# Altium footprint library SMAJ5P0A-13-F.PcbLib: 3 footprints
Each footprint in its own frame and in the unit in brackets; x right, y up, seen from the top. Pads: shape width x height; smd on the part's side, far side on the other; paste and mask are expansions set on the pad; w line width, h text height; cw(c..) or ccw(c..) is an arc to the next point about the centre after c.
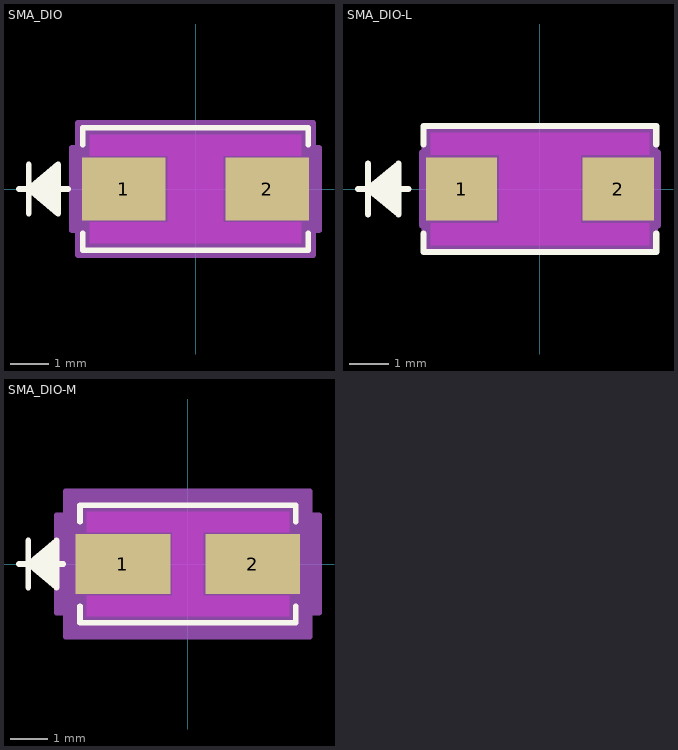
[diagram p0: the footprints below, top view; thin cyan lines are the x and y axes]

## SMA_DIO [mm]
pads (2):
  rect 2.17x1.63 smd paste+0 mask+0: 1(-1.86,0) 2(1.86,0)
Top Layer keep-out:
  region: -0.724,-0.866 -0.724,0.866 0.724,0.866 0.724,-0.866
  region: -2.744,0.866 -2.744,1.409 2.744,1.409 2.744,0.866
  region: -2.744,-1.409 -2.744,-0.866 2.744,-0.866 2.744,-1.409
Top Overlay:
  lines w0.152: -4.573,0 -3.303,0 ; -4.319,-0.635 -4.319,0.635 ; -3.557,-0.508 -4.319,0 ; -3.557,-0.381 -4.319,0 ; -3.557,-0.254 -4.319,0 ; -3.557,-0.127 -4.319,0 ; -3.557,0.127 -4.319,0 ; -3.557,0.254 -4.319,0 ; -3.557,0.381 -4.319,0 ; -3.557,0.508 -4.319,0 ; -2.922,-1.148 -2.922,-1.587 2.922,-1.587 2.922,-1.148 ; -2.922,1.148 -2.922,1.587 2.922,1.587 2.922,1.148 ; -4.319,0 -3.557,0.635 -3.557,-0.635 -4.319,0
  text ".Designator" at -3.492,-0.635 h1.27
Keep-Out Layer:
  region: -0.724,-0.866 -0.724,0.866 0.724,0.866 0.724,-0.866
Mechanical 13:
  lines w0.025: -4.573,0 -3.303,0 ; -4.319,-0.635 -4.319,0.635 ; -3.557,-0.508 -4.319,0 ; -3.557,-0.381 -4.319,0 ; -3.557,-0.254 -4.319,0 ; -3.557,-0.127 -4.319,0 ; -3.557,0.127 -4.319,0 ; -3.557,0.254 -4.319,0 ; -3.557,0.381 -4.319,0 ; -3.557,0.508 -4.319,0 ; -4.319,0 -3.557,0.635 -3.557,-0.635 -4.319,0 ; -2.795,-1.46 2.795,-1.46 2.795,1.46 -2.795,1.46 -2.795,-1.46
  text ".Designator" at -3.492,-0.635 h1.27
Mechanical 15:
  region: -3.049,-1.069 -3.199,-1.069 -3.199,1.069 -3.049,1.069 -3.049,1.714 3.049,1.714 3.049,1.069 3.199,1.069 3.199,-1.069 3.049,-1.069 3.049,-1.714 -3.049,-1.714
  lines w0.152: -3.199,-1.069 -3.199,1.069 -3.049,1.069 -3.049,1.714 3.049,1.714 3.049,1.069 3.199,1.069 3.199,-1.069 3.049,-1.069 3.049,-1.714 -3.049,-1.714 -3.049,-1.069 -3.199,-1.069
3D body "SMA_DIO.step": height 2.35, standoff 0, extent -2.795,-1.46 2.795,1.46

## SMA_DIO-L [mm]
pads (2):
  rect 1.79x1.58 smd paste+0 mask+0: 1(-1.97,0) 2(1.97,0)
Top Layer keep-out:
  region: -1.024,-0.866 -1.024,0.866 1.024,0.866 1.024,-0.866
  region: -2.744,0.866 -2.744,1.409 2.744,1.409 2.744,0.866
  region: -2.744,-1.409 -2.744,-0.866 2.744,-0.866 2.744,-1.409
Top Overlay:
  lines w0.152: -4.573,0 -3.303,0 ; -4.319,-0.635 -4.319,0.635 ; -3.557,-0.508 -4.319,0 ; -3.557,-0.381 -4.319,0 ; -3.557,-0.254 -4.319,0 ; -3.557,-0.127 -4.319,0 ; -3.557,0.127 -4.319,0 ; -3.557,0.254 -4.319,0 ; -3.557,0.381 -4.319,0 ; -3.557,0.508 -4.319,0 ; -2.922,-1.118 -2.922,-1.587 2.922,-1.587 2.922,-1.118 ; -2.922,1.118 -2.922,1.587 2.922,1.587 2.922,1.118 ; -4.319,0 -3.557,0.635 -3.557,-0.635 -4.319,0
  text ".Designator" at -3.492,-0.635 h1.27
Keep-Out Layer:
  region: -1.024,-0.866 -1.024,0.866 1.024,0.866 1.024,-0.866
Mechanical 13:
  lines w0.025: -4.573,0 -3.303,0 ; -4.319,-0.635 -4.319,0.635 ; -3.557,-0.508 -4.319,0 ; -3.557,-0.381 -4.319,0 ; -3.557,-0.254 -4.319,0 ; -3.557,-0.127 -4.319,0 ; -3.557,0.127 -4.319,0 ; -3.557,0.254 -4.319,0 ; -3.557,0.381 -4.319,0 ; -3.557,0.508 -4.319,0 ; -4.319,0 -3.557,0.635 -3.557,-0.635 -4.319,0 ; -2.795,-1.46 2.795,-1.46 2.795,1.46 -2.795,1.46 -2.795,-1.46
  text ".Designator" at -3.492,-0.635 h1.27
Mechanical 15:
  region: -2.897,-0.917 -2.967,-0.917 -2.967,0.917 -2.897,0.917 -2.897,1.562 2.897,1.562 2.897,0.917 2.967,0.917 2.967,-0.917 2.897,-0.917 2.897,-1.562 -2.897,-1.562
  lines w0.152: -2.967,-0.917 -2.967,0.917 -2.897,0.917 -2.897,1.562 2.897,1.562 2.897,0.917 2.967,0.917 2.967,-0.917 2.897,-0.917 2.897,-1.562 -2.897,-1.562 -2.897,-0.917 -2.967,-0.917
3D body "SMA_DIO.step": height 2.35, standoff 0, extent -2.795,-1.46 2.795,1.46

## SMA_DIO-M [mm]
pads (2):
  rect 2.57x1.63 smd paste+0 mask+0: 1(-1.76,0) 2(1.76,0)
Top Layer keep-out:
  region: -0.424,-0.866 -0.424,0.866 0.424,0.866 0.424,-0.866
  region: -2.744,0.866 -2.744,1.409 2.744,1.409 2.744,0.866
  region: -2.744,-1.409 -2.744,-0.866 2.744,-0.866 2.744,-1.409
Top Overlay:
  lines w0.152: -4.573,0 -3.378,0 ; -4.319,-0.635 -4.319,0.635 ; -3.557,-0.508 -4.319,0 ; -3.557,-0.381 -4.319,0 ; -3.557,-0.254 -4.319,0 ; -3.557,-0.127 -4.319,0 ; -3.557,0.127 -4.319,0 ; -3.557,0.254 -4.319,0 ; -3.557,0.381 -4.319,0 ; -3.557,0.508 -4.319,0 ; -2.922,-1.148 -2.922,-1.587 2.922,-1.587 2.922,-1.148 ; -2.922,1.148 -2.922,1.587 2.922,1.587 2.922,1.148 ; -4.319,0 -3.557,0.635 -3.557,-0.635 -4.319,0
  text ".Designator" at -3.492,-0.635 h1.27
Keep-Out Layer:
  region: -0.424,-0.866 -0.424,0.866 0.424,0.866 0.424,-0.866
Mechanical 13:
  lines w0.025: -4.573,0 -3.303,0 ; -4.319,-0.635 -4.319,0.635 ; -3.557,-0.508 -4.319,0 ; -3.557,-0.381 -4.319,0 ; -3.557,-0.254 -4.319,0 ; -3.557,-0.127 -4.319,0 ; -3.557,0.127 -4.319,0 ; -3.557,0.254 -4.319,0 ; -3.557,0.381 -4.319,0 ; -3.557,0.508 -4.319,0 ; -4.319,0 -3.557,0.635 -3.557,-0.635 -4.319,0 ; -2.795,-1.46 2.795,-1.46 2.795,1.46 -2.795,1.46 -2.795,-1.46
  text ".Designator" at -3.492,-0.635 h1.27
Mechanical 15:
  region: -3.303,-1.323 -3.553,-1.323 -3.553,1.323 -3.303,1.323 -3.303,1.968 3.303,1.968 3.303,1.323 3.553,1.323 3.553,-1.323 3.303,-1.323 3.303,-1.968 -3.303,-1.968
  lines w0.152: -3.553,-1.323 -3.553,1.323 -3.303,1.323 -3.303,1.968 3.303,1.968 3.303,1.323 3.553,1.323 3.553,-1.323 3.303,-1.323 3.303,-1.968 -3.303,-1.968 -3.303,-1.323 -3.553,-1.323
3D body "SMA_DIO.step": height 2.35, standoff 0, extent -2.795,-1.46 2.795,1.46